# Altium schematic symbol library TPS7A0233PDBVR.SchLib: 1 symbol
Pins are listed as number, name and electrical type; pins without a type are passive.

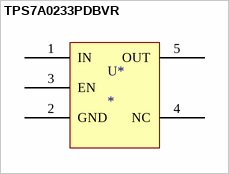
[diagram p0: symbol TPS7A0233PDBVR]

## TPS7A0233PDBVR
designator U*
200mA, nanopower-IQ (25 nA), low-dropout (LDO) voltage regulator with enable
footprint SOT95P280X145-5N
pins: 1 IN, 2 GND, 3 EN, 4 NC, 5 OUT